# Altium schematic symbol library RR123-1H02-612.SchLib: 1 symbol
Pins are listed as number, name and electrical type; pins without a type are passive.

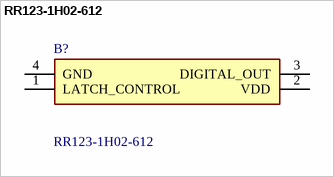
[diagram p0: symbol RR123-1H02-612]

## RR123-1H02-612
designator B?
Digital Switch Special Purpose Push-Pull Magnetoresistive 4-LGA (1.45x1.45); Manufacturer_Name: Coto Technology; Geometry.Height: 0.486mm; Manufacturer_Part_Number: RR123-1H02-612; Mouser Part Number: *; Mouser Price/Stock: *; Arrow Part Number: *; Arrow Price/Stock: *; Datasheet Link: https://www.digikey.ph/en/products/detail/coto-technology/rr123-1h02-612/25649459?msockid=39f1ec84d77b6f4428b7f904d6676eed
footprint RR1231H02612
pins: 1 LATCH_CONTROL, 2 VDD, 3 DIGITAL_OUT, 4 GND